# Altium footprint library CB3S.PcbLib: 1 footprints
Each footprint in its own frame and in the unit in brackets; x right, y up, seen from the top. Pads: shape width x height; smd on the part's side, far side on the other; paste and mask are expansions set on the pad; w line width, h text height; cw(c..) or ccw(c..) is an arc to the next point about the centre after c.
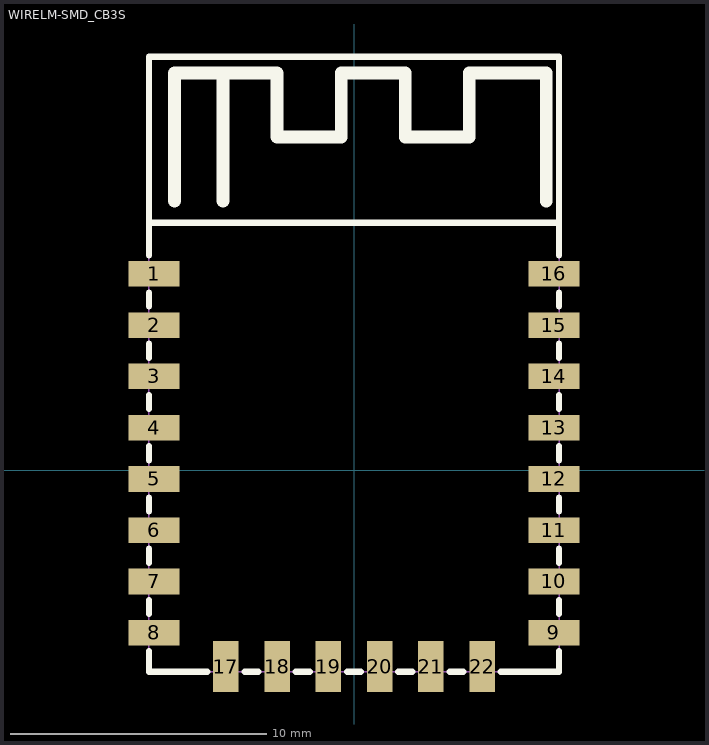
[diagram p0: the footprint, top view; thin cyan lines are the x and y axes]

## WIRELM-SMD_CB3S [mm] "Tuya CB3S(tjrl) 16x24 mm, LCSC C2844243 (EasyEDA official footprint)"
height 3.3
pads (22):
  rect 2x1 smd: 1(-7.8,7.66) 2(-7.8,5.66) 3(-7.8,3.66) 4(-7.8,1.66) 5(-7.8,-0.34) 6(-7.8,-2.34) 7(-7.8,-4.34) 8(-7.8,-6.34) 9(7.8,-6.34) 10(7.8,-4.34) 11(7.8,-2.34) 12(7.8,-0.34) 13(7.8,1.66) 14(7.8,3.66) 15(7.8,5.66) 16(7.8,7.66)
  rect 1x2 smd: 17(-5,-7.66) 18(-3,-7.66) 19(-1,-7.66) 20(1,-7.66) 21(3,-7.66) 22(5,-7.66)
Top Overlay:
  circle w0.06: c-8,16.14 r0.03
  lines w0.25: -8,-7.07 -8,-7.86 -5.73,-7.86 ; -8,-5.61 -8,-5.07 ; -8,-3.61 -8,-3.07 ; -8,-1.61 -8,-1.07 ; -8,0.39 -8,0.93 ; -8,2.39 -8,2.93 ; -8,4.39 -8,4.93 ; -8,6.39 -8,6.93 ; -8,8.39 -8,16.14 8,16.14 8,8.39 ; -8,9.66 8,9.66 ; -4.27,-7.86 -3.73,-7.86 ; -2.27,-7.86 -1.73,-7.86 ; -0.27,-7.86 0.27,-7.86 ; 1.73,-7.86 2.27,-7.86 ; 3.73,-7.86 4.27,-7.86 ; 5.73,-7.86 8,-7.86 8,-7.07 ; 8,-5.61 8,-5.07 ; 8,-3.61 8,-3.07 ; 8,-1.61 8,-1.07 ; 8,0.39 8,0.93 ; 8,2.39 8,2.93 ; 8,4.39 8,4.93 ; 8,6.39 8,6.93
  lines w0.5: -7,10.5 -7,15.5 -3,15.5 -3,13 -0.5,13 -0.5,15.5 2,15.5 2,13 4.5,13 4.5,15.5 7.5,15.5 7.5,10.5 ; -5.11,10.5 -5.11,15.5
Mechanical 15:
  lines w0.05: -8,-7.86 -8,16.14 8,16.14 8,-7.86 -8,-7.86